# Altium schematic symbol library 0031.8231.SchLib: 1 symbol
Pins are listed as number, name and electrical type; pins without a type are passive.

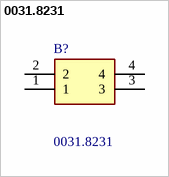
[diagram p0: symbol 0031.8231]

## 0031.8231
designator B?
Fuse Holder OGD FUSEHOLDER 5X20/6.3X32; Manufacturer_Name: SCHURTER; Geometry.Height: 12.7mm; Manufacturer_Part_Number: 0031.8231; Mouser Part Number: 693-0031.8231; Mouser Price/Stock: https://www.mouser.co.uk/ProductDetail/Schurter/0031.8231?qs=ExMueETPIigm1KV%252B6T9rnw%3D%3D; Arrow Part Number: 0031.8231; Arrow Price/Stock: https://www.arrow.com/en/products/0031.8231/schurter?utm_currency=USD&region=europe; Datasheet Link: https://www.schurter.com/en/datasheet/typ_OGD.pdf
footprint 00318231
pins: 1, 2, 3, 4